# Altium schematic symbol library LTC4417IUFPBF.SchLib: 1 symbol
Pins are listed as number, name and electrical type; pins without a type are passive.

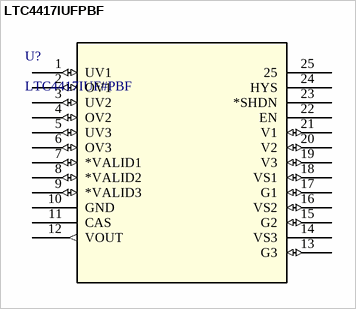
[diagram p0: symbol LTC4417IUFPBF]

## LTC4417IUFPBF
designator U?, comment LTC4417IUF#PBF
Prioritized PowerPathâ„¢ Controller; Manufacturer_Name: Analog Devices Inc; Copyright: Copyright (C) 2026 Ultra Librarian. All rights reserved.; Manufacturer_Part_Number: LTC4417IUF#PBF; RefDes: RefDes; Type: Type
footprint QFN24_LTC4417IUFPBF_ADI
pins: 1 UV1 (io), 2 OV1 (io), 3 UV2 (io), 4 OV2 (io), 5 UV3 (io), 6 OV3 (io), 7 *VALID1 (io), 8 *VALID2 (io), 9 *VALID3 (io), 10 GND (power), 11 CAS, 12 VOUT (out), 13 G3 (io), 14 VS3, 15 G2 (io), 16 VS2 (io), 17 G1 (io), 18 VS1 (io), 19 V3 (io), 20 V2 (io), 21 V1 (io), 22 EN, 23 *SHDN, 24 HYS, 25